# Altium footprint library FootPrintLib_11.PcbLib: 376 footprints (part 8 of 24)
Each footprint in its own frame and in the unit in brackets; x right, y up, seen from the top. Pads: shape width x height; smd on the part's side, far side on the other; paste and mask are expansions set on the pad; w line width, h text height; cw(c..) or ccw(c..) is an arc to the next point about the centre after c.
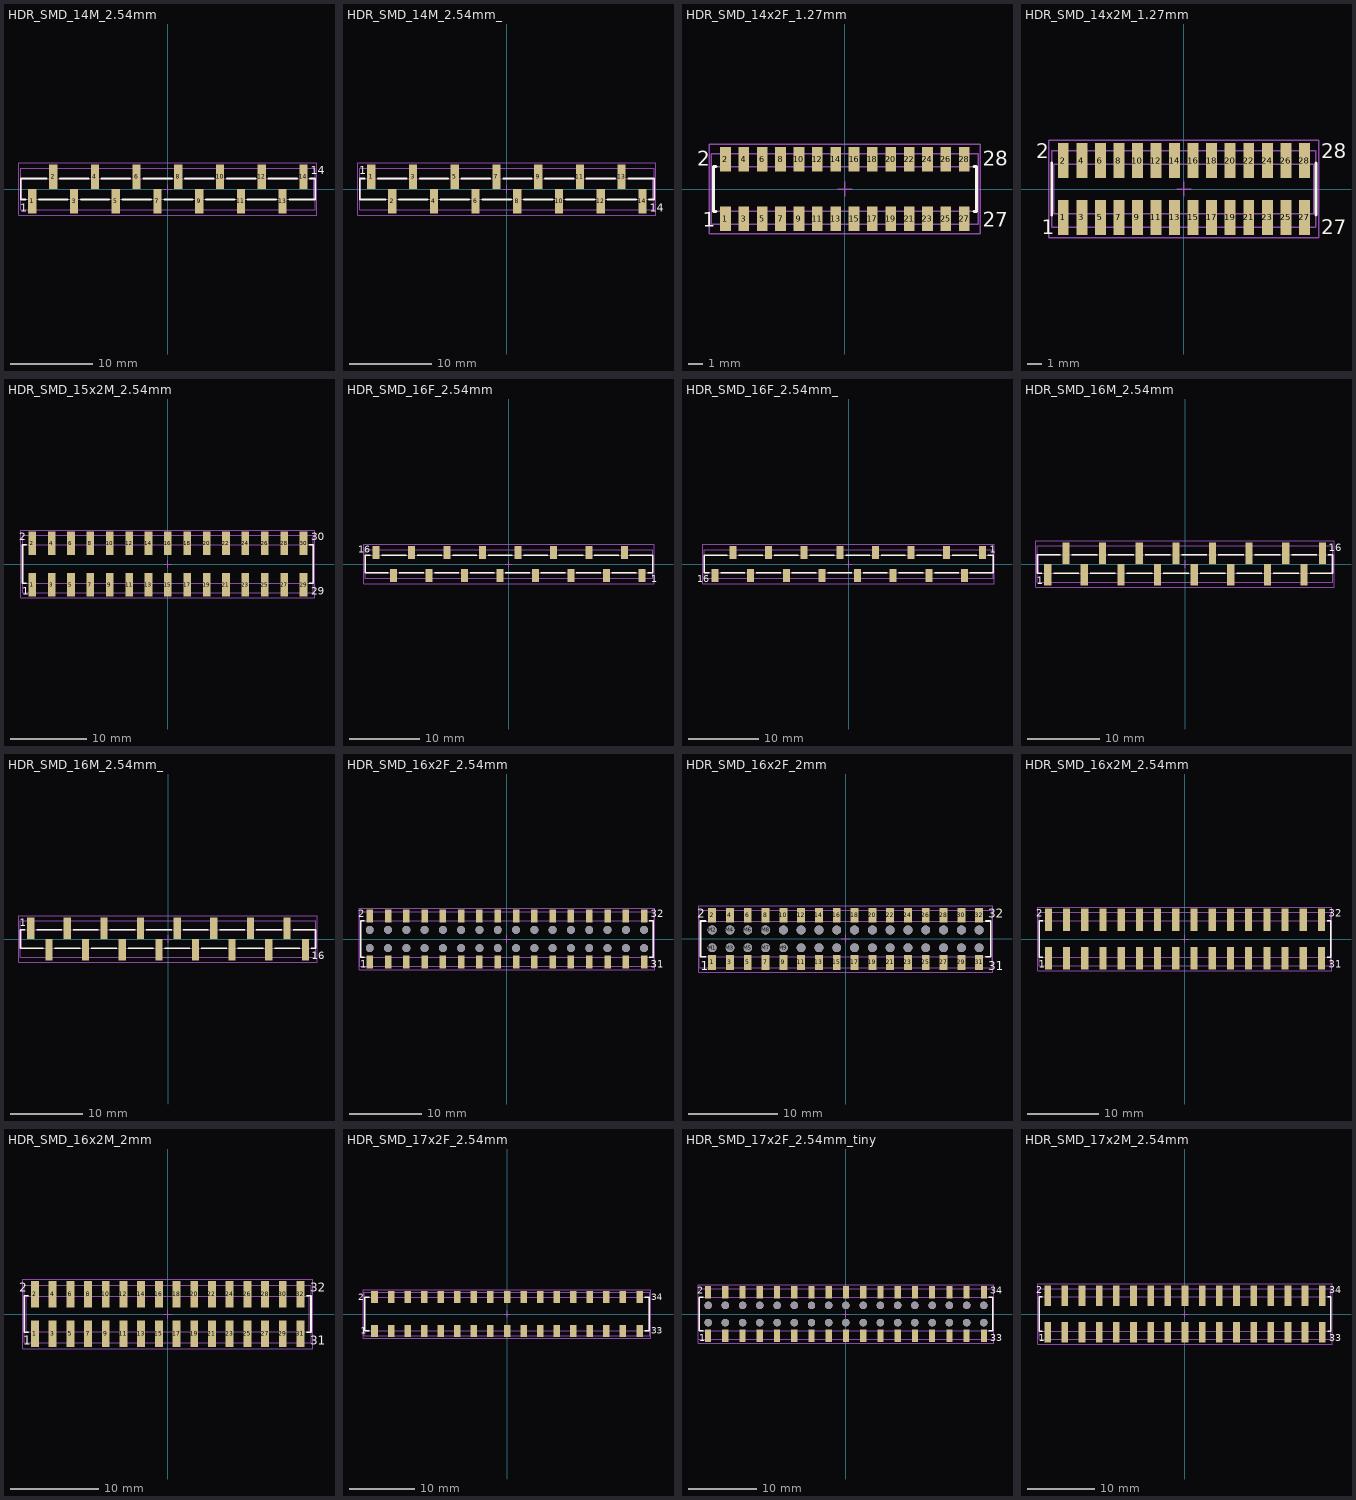
[diagram p7: the footprints below, top view; thin cyan lines are the x and y axes]

## HDR_SMD_14M_2.54mm [mm] "Pin Header, pitch 2.54 mm, SMD, Vertical, single row, 14p"
height 9.3
pads (14):
  rect 1x3 smd: 1(-16.51,-1.5) 2(-13.97,1.5) 3(-11.43,-1.5) 4(-8.89,1.5) 5(-6.35,-1.5) 6(-3.81,1.5) 7(-1.27,-1.5) 8(1.27,1.5) 9(3.81,-1.5) 10(6.35,1.5) 11(8.89,-1.5) 12(11.43,1.5) 13(13.97,-1.5) 14(16.51,1.5)
Top Overlay:
  lines w0.2: -17.3,-1.27 -17.93,-1.27 -17.93,1.27 -14.75,1.27 ; -15.7,-1.27 -12.2,-1.27 ; -13.16,1.27 -9.66,1.27 ; -10.62,-1.27 -7.12,-1.27 ; -8.08,1.27 -4.58,1.27 ; -5.54,-1.27 -2.04,-1.27 ; -3,1.27 0.5,1.27 ; -0.46,-1.27 3.04,-1.27 ; 2.08,1.27 5.58,1.27 ; 4.62,-1.27 8.12,-1.27 ; 7.16,1.27 10.66,1.27 ; 9.7,-1.27 13.2,-1.27 ; 12.24,1.27 15.74,1.27 ; 14.8,-1.27 17.93,-1.27 17.93,1.27 17.3,1.27
  text "14" at 17.4,1.8 h1
  text "1" at -18,-2.8 h1
Mechanical 11:
  lines w0.1: -17.78,-1.27 17.78,-1.27 17.78,1.27 -17.78,1.27 -17.78,-1.27
Mechanical 13:
  lines w0.1: -17.93,-2.5 -17.93,2.5 17.93,2.5 17.93,-2.5 -17.93,-2.5
Mechanical 15:
  lines w0.1: -0.5,0 0.5,0 ; 0,-0.5 0,0.5 ; -18.13,-3.2 -18.13,3.2 18.13,3.2 18.13,-3.2 -18.13,-3.2
3D body "61001418221.stp": height 9.33, standoff 0, extent -17.78,-2.5 17.78,2.5

## HDR_SMD_14M_2.54mm_ [mm] "Pin Header, pitch 2.54 mm, SMD, Vertical, single row, 14p"
height 9.3
pads (14):
  rect 1x3 smd: 1(-16.51,1.5) 2(-13.97,-1.5) 3(-11.43,1.5) 4(-8.89,-1.5) 5(-6.35,1.5) 6(-3.81,-1.5) 7(-1.27,1.5) 8(1.27,-1.5) 9(3.81,1.5) 10(6.35,-1.5) 11(8.89,1.5) 12(11.43,-1.5) 13(13.97,1.5) 14(16.51,-1.5)
Top Overlay:
  lines w0.2: -17.3,1.27 -17.93,1.27 -17.93,-1.27 -14.75,-1.27 ; -15.7,1.27 -12.2,1.27 ; -13.16,-1.27 -9.66,-1.27 ; -10.62,1.27 -7.12,1.27 ; -8.08,-1.27 -4.58,-1.27 ; -5.54,1.27 -2.04,1.27 ; -3,-1.27 0.5,-1.27 ; -0.46,1.27 3.04,1.27 ; 2.08,-1.27 5.58,-1.27 ; 4.62,1.27 8.12,1.27 ; 7.16,-1.27 10.66,-1.27 ; 9.7,1.27 13.2,1.27 ; 12.24,-1.27 15.74,-1.27 ; 14.8,1.27 17.93,1.27 17.93,-1.27 17.3,-1.27
  text "1" at -18,1.8 h1
  text "14" at 17.4,-2.8 h1
Mechanical 11:
  lines w0.1: -17.78,-1.27 17.78,-1.27 17.78,1.27 -17.78,1.27 -17.78,-1.27
Mechanical 13:
  lines w0.1: -17.93,-2.5 -17.93,2.5 17.93,2.5 17.93,-2.5 -17.93,-2.5
Mechanical 15:
  lines w0.1: -0.5,0 0.5,0 ; 0,-0.5 0,0.5 ; -18.13,-3.2 -18.13,3.2 18.13,3.2 18.13,-3.2 -18.13,-3.2
3D body "61001418321.stp": height 9.37, standoff 0.04, extent -17.78,-2.5 17.78,2.5

## HDR_SMD_14x2F_1.27mm [mm] "Socket Header, Pitch 1.27 mm, SMT, Vertical, dual row, 28p"
height 4.7
pads (28):
  rect 0.74x1.7 smd: 1(-8.255,-2.05) 2(-8.255,2.05) 3(-6.985,-2.05) 4(-6.985,2.05) 5(-5.715,-2.05) 6(-5.715,2.05) 7(-4.445,-2.05) 8(-4.445,2.05) 9(-3.175,-2.05) 10(-3.175,2.05) 11(-1.905,-2.05) 12(-1.905,2.05) 13(-0.635,-2.05) 14(-0.635,2.05) 15(0.635,-2.05) 16(0.635,2.05) 17(1.905,-2.05) 18(1.905,2.05) 19(3.175,-2.05) 20(3.175,2.05) 21(4.445,-2.05) 22(4.445,2.05) 23(5.715,-2.05) 24(5.715,2.05) 25(6.985,-2.05) 26(6.985,2.05) 27(8.255,-2.05) 28(8.255,2.05)
Top Overlay:
  lines w0.2: -8.92,-1.55 -9.09,-1.55 -9.09,1.55 -8.92,1.55 ; 8.92,-1.55 9.09,-1.55 9.09,1.55 8.92,1.55
  text "2" at -10.22,1.6 h1
  text "1" at -9.82,-2.6 h1
  text "27" at 9.52,-2.6 h1
  text "28" at 9.52,1.6 h1
Mechanical 11:
  lines w0.1: -9.09,-1.55 -9.09,1.55 9.09,1.55 9.09,-1.55 -9.09,-1.55
Mechanical 13:
  lines w0.1: -9.24,-2.425 9.24,-2.425 9.24,2.425 -9.24,2.425 -9.24,-2.425
Mechanical 15:
  lines w0.1: -0.5,0 0.5,0 ; 0,-0.5 0,0.5 ; -9.37,-3.1 9.37,-3.1 9.37,3.1 -9.37,3.1 -9.37,-3.1
3D body "62302821021.stp": height 4.6, standoff 0, extent -9.09,-2.299 9.09,2.299

## HDR_SMD_14x2M_1.27mm [mm] "Pin Header, pitch 1.27 mm, SMD, Vertical, dual row, 28p"
height 6.1
pads (28):
  rect 0.75x2.4 smd: 1(-8.255,-1.95) 2(-8.255,1.95) 3(-6.985,-1.95) 4(-6.985,1.95) 5(-5.715,-1.95) 6(-5.715,1.95) 7(-4.445,-1.95) 8(-4.445,1.95) 9(-3.175,-1.95) 10(-3.175,1.95) 11(-1.905,-1.95) 12(-1.905,1.95) 13(-0.635,-1.95) 14(-0.635,1.95) 15(0.635,-1.95) 16(0.635,1.95) 17(1.905,-1.95) 18(1.905,1.95) 19(3.175,-1.95) 20(3.175,1.95) 21(4.445,-1.95) 22(4.445,1.95) 23(5.715,-1.95) 24(5.715,1.95) 25(6.985,-1.95) 26(6.985,1.95) 27(8.255,-1.95) 28(8.255,1.95)
Top Overlay:
  lines w0.2: -9.04,-1.775 -9.04,1.775 ; 9.04,-1.775 9.04,1.775
  text "2" at -10.12,2.1 h1
  text "1" at -9.72,-3.1 h1
  text "27" at 9.42,-3.1 h1
  text "28" at 9.42,2.1 h1
Mechanical 11:
  lines w0.1: -8.89,-1.7 8.89,-1.7 8.89,1.7 -8.89,1.7 -8.89,-1.7
Mechanical 13:
  lines w0.1: -9.04,-2.625 -9.04,2.625 9.04,2.625 9.04,-2.625 -9.04,-2.625
Mechanical 15:
  lines w0.1: -0.5,0 0.5,0 ; 0,-0.5 0,0.5 ; -9.24,-3.35 -9.24,3.35 9.24,3.35 9.24,-3.35 -9.24,-3.35
3D body "62132821021.stp": height 5.9, standoff 0, extent -8.89,-2.55 8.89,2.55

## HDR_SMD_15x2M_2.54mm [mm] "Pin Header, pitch 2.54 mm, SMD, Vertical, dual row, 30p"
height 9.6
pads (30):
  rect 1x3.1 smd: 1(-17.78,-2.7) 2(-17.78,2.7) 3(-15.24,-2.7) 4(-15.24,2.7) 5(-12.7,-2.7) 6(-12.7,2.7) 7(-10.16,-2.7) 8(-10.16,2.7) 9(-7.62,-2.7) 10(-7.62,2.7) 11(-5.08,-2.7) 12(-5.08,2.7) 13(-2.54,-2.7) 14(-2.54,2.7) 15(0,-2.7) 16(0,2.7) 17(2.54,-2.7) 18(2.54,2.7) 19(5.08,-2.7) 20(5.08,2.7) 21(7.62,-2.7) 22(7.62,2.7) 23(10.16,-2.7) 24(10.16,2.7) 25(12.7,-2.7) 26(12.7,2.7) 27(15.24,-2.7) 28(15.24,2.7) 29(17.78,-2.7) 30(17.78,2.7)
Top Overlay:
  lines w0.2: -18.56,-2.54 -19.05,-2.54 -19.05,2.54 -18.56,2.54 ; 18.56,-2.54 19.05,-2.54 19.05,2.54 18.56,2.54
  text "1" at -19.11,-4 h1
  text "2" at -19.51,3.1 h1
  text "29" at 18.81,-4 h1
  text "30" at 18.81,3.1 h1
Mechanical 11:
  lines w0.1: -19.05,-2.54 19.05,-2.54 19.05,2.54 -19.05,2.54 -19.05,-2.54
Mechanical 13:
  lines w0.1: -19.05,-3.75 -19.05,3.75 19.05,3.75 19.05,-3.75 -19.05,-3.75
Mechanical 15:
  lines w0.1: -0.5,0 0.5,0 ; 0,-0.5 0,0.5 ; -19.25,-4.45 -19.25,4.45 19.25,4.45 19.25,-4.45 -19.25,-4.45
3D body "61003021121.stp": height 9.62, standoff 0.02, extent -19.05,-3.75 19.05,3.75

## HDR_SMD_16F_2.54mm [mm] "Socket Header, Pitch 2.54 mm, SMT, Vertical, single row, 16p"
height 7.5
pads (16):
  rect 1x1.91 smd: 1(19.05,-1.645) 2(16.51,1.645) 3(13.97,-1.645) 4(11.43,1.645) 5(8.89,-1.645) 6(6.35,1.645) 7(3.81,-1.645) 8(1.27,1.645) 9(-1.27,-1.645) 10(-3.81,1.645) 11(-6.35,-1.645) 12(-8.89,1.645) 13(-11.43,-1.645) 14(-13.97,1.645) 15(-16.51,-1.645) 16(-19.05,1.645)
Top Overlay:
  lines w0.2: -19.84,1.25 -20.57,1.25 -20.57,-1.25 -17.29,-1.25 ; -18.24,1.25 -14.74,1.25 ; -15.74,-1.25 -12.24,-1.25 ; -13.16,1.25 -9.66,1.25 ; -10.66,-1.25 -7.16,-1.25 ; -8.08,1.25 -4.58,1.25 ; -5.58,-1.25 -2.08,-1.25 ; -3,1.25 0.5,1.25 ; -0.5,-1.25 3,-1.25 ; 2.08,1.25 5.58,1.25 ; 4.58,-1.25 8.08,-1.25 ; 7.16,1.25 10.66,1.25 ; 9.66,-1.25 13.16,-1.25 ; 12.24,1.25 15.74,1.25 ; 14.74,-1.25 18.24,-1.25 ; 17.29,1.25 20.57,1.25 20.57,-1.25 19.84,-1.25
  text "1" at 20.34,-2.6 h1
  text "16" at -21.62,1.6 h1
Mechanical 11:
  lines w0.1: -20.57,-1.25 20.57,-1.25 20.57,1.25 -20.57,1.25 -20.57,-1.25
Mechanical 13:
  lines w0.1: -20.57,-2.025 20.57,-2.025 20.57,2.025 -20.57,2.025 -20.57,-2.025
Mechanical 15:
  lines w0.1: -0.5,0 0.5,0 ; 0,-0.5 0,0.5 ; -20.77,-2.8 20.77,-2.8 20.77,2.8 -20.77,2.8 -20.77,-2.8
3D body "61001611921.stp": height 7.5, standoff 0, extent -20.57,-2.025 20.57,2.025

## HDR_SMD_16F_2.54mm_ [mm] "Socket Header, Pitch 2.54 mm, SMT, Vertical, single row, 16p"
height 7.5
pads (16):
  rect 1x1.91 smd: 1(19.05,1.645) 2(16.51,-1.645) 3(13.97,1.645) 4(11.43,-1.645) 5(8.89,1.645) 6(6.35,-1.645) 7(3.81,1.645) 8(1.27,-1.645) 9(-1.27,1.645) 10(-3.81,-1.645) 11(-6.35,1.645) 12(-8.89,-1.645) 13(-11.43,1.645) 14(-13.97,-1.645) 15(-16.51,1.645) 16(-19.05,-1.645)
Top Overlay:
  lines w0.2: -19.84,-1.25 -20.57,-1.25 -20.57,1.25 -17.29,1.25 ; -18.24,-1.25 -14.79,-1.25 ; -15.69,1.25 -12.24,1.25 ; -13.16,-1.25 -9.71,-1.25 ; -10.61,1.25 -7.16,1.25 ; -8.08,-1.25 -4.63,-1.25 ; -5.53,1.25 -2.08,1.25 ; -3,-1.25 0.45,-1.25 ; -0.45,1.25 3,1.25 ; 2.08,-1.25 5.53,-1.25 ; 4.63,1.25 8.08,1.25 ; 7.16,-1.25 10.61,-1.25 ; 9.71,1.25 13.16,1.25 ; 12.24,-1.25 15.69,-1.25 ; 14.79,1.25 18.24,1.25 ; 17.29,-1.25 20.57,-1.25 20.57,1.25 19.84,1.25
  text "1" at 20.14,1.6 h1
  text "16" at -21.62,-2.6 h1
Mechanical 11:
  lines w0.1: -20.57,-1.25 20.57,-1.25 20.57,1.25 -20.57,1.25 -20.57,-1.25
Mechanical 13:
  lines w0.1: -20.57,-2.025 -20.57,2.025 20.57,2.025 20.57,-2.025 -20.57,-2.025
Mechanical 15:
  lines w0.1: -0.5,0 0.5,0 ; 0,-0.5 0,0.5 ; -20.77,-2.8 -20.77,2.8 20.77,2.8 20.77,-2.8 -20.77,-2.8
3D body "61001613321.stp": height 7.5, standoff 0, extent -20.57,-2.025 20.57,2.025

## HDR_SMD_16M_2.54mm [mm] "Pin Header, pitch 2.54 mm, SMD, Vertical, single row, 16p"
height 9.3
pads (16):
  rect 1x3 smd: 1(-19.05,-1.5) 2(-16.51,1.5) 3(-13.97,-1.5) 4(-11.43,1.5) 5(-8.89,-1.5) 6(-6.35,1.5) 7(-3.81,-1.5) 8(-1.27,1.5) 9(1.27,-1.5) 10(3.81,1.5) 11(6.35,-1.5) 12(8.89,1.5) 13(11.43,-1.5) 14(13.97,1.5) 15(16.51,-1.5) 16(19.05,1.5)
Top Overlay:
  lines w0.2: -19.84,-1.27 -20.47,-1.27 -20.47,1.27 -17.29,1.27 ; -18.24,-1.27 -14.74,-1.27 ; -15.7,1.27 -12.2,1.27 ; -13.16,-1.27 -9.66,-1.27 ; -10.62,1.27 -7.12,1.27 ; -8.08,-1.27 -4.58,-1.27 ; -5.54,1.27 -2.04,1.27 ; -3,-1.27 0.5,-1.27 ; -0.46,1.27 3.04,1.27 ; 2.08,-1.27 5.58,-1.27 ; 4.62,1.27 8.12,1.27 ; 7.16,-1.27 10.66,-1.27 ; 9.7,1.27 13.2,1.27 ; 12.24,-1.27 15.74,-1.27 ; 14.78,1.27 18.28,1.27 ; 17.34,-1.27 20.47,-1.27 20.47,1.27 19.84,1.27
  text "1" at -20.54,-2.8 h1
  text "16" at 19.94,1.8 h1
Mechanical 11:
  lines w0.1: -20.32,-1.27 -20.32,1.27 20.32,1.27 20.32,-1.27 -20.32,-1.27
Mechanical 13:
  lines w0.1: -20.47,-2.5 20.47,-2.5 20.47,2.5 -20.47,2.5 -20.47,-2.5
Mechanical 15:
  lines w0.1: -0.5,0 0.5,0 ; 0,-0.5 0,0.5 ; -20.67,-3.2 20.67,-3.2 20.67,3.2 -20.67,3.2 -20.67,-3.2
3D body "61001618221.stp": height 9.33, standoff 0, extent -20.32,-2.5 20.32,2.5

## HDR_SMD_16M_2.54mm_ [mm] "Pin Header, pitch 2.54 mm, SMD, Vertical, single row, 16p"
height 9.3
pads (16):
  rect 1x3 smd: 1(-19.05,1.5) 2(-16.51,-1.5) 3(-13.97,1.5) 4(-11.43,-1.5) 5(-8.89,1.5) 6(-6.35,-1.5) 7(-3.81,1.5) 8(-1.27,-1.5) 9(1.27,1.5) 10(3.81,-1.5) 11(6.35,1.5) 12(8.89,-1.5) 13(11.43,1.5) 14(13.97,-1.5) 15(16.51,1.5) 16(19.05,-1.5)
Top Overlay:
  lines w0.2: -19.84,1.27 -20.47,1.27 -20.47,-1.27 -17.29,-1.27 ; -18.24,1.27 -14.74,1.27 ; -15.7,-1.27 -12.2,-1.27 ; -13.16,1.27 -9.66,1.27 ; -10.62,-1.27 -7.12,-1.27 ; -8.08,1.27 -4.58,1.27 ; -5.54,-1.27 -2.04,-1.27 ; -3,1.27 0.5,1.27 ; -0.46,-1.27 3.04,-1.27 ; 2.08,1.27 5.58,1.27 ; 4.62,-1.27 8.12,-1.27 ; 7.16,1.27 10.66,1.27 ; 9.7,-1.27 13.2,-1.27 ; 12.24,1.27 15.74,1.27 ; 14.78,-1.27 18.28,-1.27 ; 17.34,1.27 20.47,1.27 20.47,-1.27 19.84,-1.27
  text "1" at -20.54,1.8 h1
  text "16" at 19.94,-2.8 h1
Mechanical 11:
  lines w0.1: -20.32,-1.27 20.32,-1.27 20.32,1.27 -20.32,1.27 -20.32,-1.27
Mechanical 13:
  lines w0.1: -20.47,-2.5 -20.47,2.5 20.47,2.5 20.47,-2.5 -20.47,-2.5
Mechanical 15:
  lines w0.1: -0.5,0 0.5,0 ; 0,-0.5 0,0.5 ; -20.67,-3.2 -20.67,3.2 20.67,3.2 20.67,-3.2 -20.67,-3.2
3D body "61001618321.stp": height 9.37, standoff 0.04, extent -20.32,-2.5 20.32,2.5

## HDR_SMD_16x2F_2.54mm [mm] "Socket Header, Pitch 2.54 mm, SMT, Vertical, dual row, 32p"
height 3.7
pads (64):
  rect 0.9x1.8 smd: 1(-19.05,-3.2) 2(-19.05,3.2) 3(-16.51,-3.2) 4(-16.51,3.2) 5(-13.97,-3.2) 6(-13.97,3.2) 7(-11.43,-3.2) 8(-11.43,3.2) 9(-8.89,-3.2) 10(-8.89,3.2) 11(-6.35,-3.2) 12(-6.35,3.2) 13(-3.81,-3.2) 14(-3.81,3.2) 15(-1.27,-3.2) 16(-1.27,3.2) 17(1.27,-3.2) 18(1.27,3.2) 19(3.81,-3.2) 20(3.81,3.2) 21(6.35,-3.2) 22(6.35,3.2) 23(8.89,-3.2) 24(8.89,3.2) 25(11.43,-3.2) 26(11.43,3.2) 27(13.97,-3.2) 28(13.97,3.2) 29(16.51,-3.2) 30(16.51,3.2) 31(19.05,-3.2) 32(19.05,3.2)
  round 1.1 hole 1.1 unplated: MH1(-19.05,-1.27) MH2(-19.05,1.27) MH3(-16.51,-1.27) MH4(-16.51,1.27) MH5(-13.97,-1.27) MH6(-13.97,1.27) MH7(-11.43,-1.27) MH8(-11.43,1.27) MH9(-8.89,-1.27) MH10(-8.89,1.27) MH11(-6.35,-1.27) MH12(-6.35,1.27) MH13(-3.81,-1.27) MH14(-3.81,1.27) MH15(-1.27,-1.27) MH16(-1.27,1.27) MH17(1.27,-1.27) MH18(1.27,1.27) MH19(3.81,-1.27) MH20(3.81,1.27) MH21(6.35,-1.27) MH22(6.35,1.27) MH23(8.89,-1.27) MH24(8.89,1.27) MH25(11.43,-1.27) MH26(11.43,1.27) MH27(13.97,-1.27) MH28(13.97,1.27) MH29(16.51,-1.27) MH30(16.51,1.27) MH31(19.05,-1.27) MH32(19.05,1.27)
Top Overlay:
  lines w0.2: -19.78,-2.5 -20.32,-2.5 -20.32,2.5 -19.78,2.5 ; 19.78,-2.5 20.32,-2.5 20.32,2.5 19.78,2.5
  text "2" at -20.68,3 h1
  text "1" at -20.38,-4 h1
  text "32" at 19.98,3 h1
  text "31" at 19.98,-4 h1
Mechanical 11:
  lines w0.1: -20.32,-2.5 20.32,-2.5 20.32,2.5 -20.32,2.5 -20.32,-2.5
Mechanical 13:
  lines w0.1: -20.47,-3.75 20.47,-3.75 20.47,3.75 -20.47,3.75 -20.47,-3.75
Mechanical 15:
  lines w0.1: -0.5,0 0.5,0 ; 0,-0.5 0,0.5 ; -20.52,-4.3 20.52,-4.3 20.52,4.3 -20.52,4.3 -20.52,-4.3
3D body "610032243021.stp": height 3.7, standoff 0, extent -20.32,-3.603 20.32,3.603

## HDR_SMD_16x2F_2mm [mm] "Socket Header, Pitch 2.00 mm, SMT, Vertical, dual row, 32p"
height 4.85
pads (64):
  rect 0.89x1.65 smd: 1(-15,-2.65) 2(-15,2.65) 3(-13,-2.65) 4(-13,2.65) 5(-11,-2.65) 6(-11,2.65) 7(-9,-2.65) 8(-9,2.65) 9(-7,-2.65) 10(-7,2.65) 11(-5,-2.65) 12(-5,2.65) 13(-3,-2.65) 14(-3,2.65) 15(-1,-2.65) 16(-1,2.65) 17(1,-2.65) 18(1,2.65) 19(3,-2.65) 20(3,2.65) 21(5,-2.65) 22(5,2.65) 23(7,-2.65) 24(7,2.65) 25(9,-2.65) 26(9,2.65) 27(11,-2.65) 28(11,2.65) 29(13,-2.65) 30(13,2.65) 31(15,-2.65) 32(15,2.65)
  round 1 hole 1 unplated: M1(-15,-1) M2(-15,1) M3(-13,-1) M4(-13,1) M5(-11,-1) M6(-11,1) M7(-9,-1) M8(-9,1) M9(-7,-1) M10(-7,1) M11(-5,-1) M12(-5,1) M13(-3,-1) M14(-3,1) M15(-1,-1) M16(-1,1) M17(1,-1) M18(1,1) M19(3,-1) M20(3,1) M21(5,-1) M22(5,1) M23(7,-1) M24(7,1) M25(9,-1) M26(9,1) M27(11,-1) M28(11,1) M29(13,-1) M30(13,1) M31(15,-1) M32(15,1)
Top Overlay:
  lines w0.2: -15.75,-2 -16.3,-2 -16.3,2 -15.75,2 ; 15.75,-2 16.3,-2 16.3,2 15.75,2
  text "1" at -16.3,-3.5 h1
  text "2" at -16.7,2.4 h1
  text "31" at 16,-3.5 h1
  text "32" at 16,2.4 h1
Mechanical 11:
  lines w0.1: -16.3,-2 -16.3,2 16.3,2 16.3,-2 -16.3,-2
Mechanical 13:
  lines w0.1: -16.45,-3.225 -16.45,3.225 16.45,3.225 16.45,-3.225 -16.45,-3.225
Mechanical 15:
  lines w0.1: -0.5,0 0.5,0 ; 0,-0.5 0,0.5 ; -16.5,-3.734 -16.5,3.708 16.5,3.708 16.5,-3.734 -16.5,-3.734
3D body "621332242921.stp": height 4.5, standoff 0, extent -16.25,-2.897 16.25,2.898

## HDR_SMD_16x2M_2.54mm [mm] "Pin Header, pitch 2.54 mm, SMD, Vertical, dual row, 32p"
height 9.6
pads (32):
  rect 1x3.1 smd: 1(-19.05,-2.7) 2(-19.05,2.7) 3(-16.51,-2.7) 4(-16.51,2.7) 5(-13.97,-2.7) 6(-13.97,2.7) 7(-11.43,-2.7) 8(-11.43,2.7) 9(-8.89,-2.7) 10(-8.89,2.7) 11(-6.35,-2.7) 12(-6.35,2.7) 13(-3.81,-2.7) 14(-3.81,2.7) 15(-1.27,-2.7) 16(-1.27,2.7) 17(1.27,-2.7) 18(1.27,2.7) 19(3.81,-2.7) 20(3.81,2.7) 21(6.35,-2.7) 22(6.35,2.7) 23(8.89,-2.7) 24(8.89,2.7) 25(11.43,-2.7) 26(11.43,2.7) 27(13.97,-2.7) 28(13.97,2.7) 29(16.51,-2.7) 30(16.51,2.7) 31(19.05,-2.7) 32(19.05,2.7)
Top Overlay:
  lines w0.2: -19.83,-2.54 -20.32,-2.54 -20.32,2.54 -19.83,2.54 ; 19.83,-2.54 20.32,-2.54 20.32,2.54 19.83,2.54
  text "1" at -20.38,-4 h1
  text "2" at -20.78,3.1 h1
  text "31" at 20.08,-4 h1
  text "32" at 20.08,3.1 h1
Mechanical 11:
  lines w0.1: -20.32,-2.54 20.32,-2.54 20.32,2.54 -20.32,2.54 -20.32,-2.54
Mechanical 13:
  lines w0.1: -20.32,-3.75 -20.32,3.75 20.32,3.75 20.32,-3.75 -20.32,-3.75
Mechanical 15:
  lines w0.1: -0.5,0 0.5,0 ; 0,-0.5 0,0.5 ; -20.52,-4.45 -20.52,4.45 20.52,4.45 20.52,-4.45 -20.52,-4.45
3D body "61003221121.stp": height 9.62, standoff 0.02, extent -20.32,-3.75 20.32,3.75

## HDR_SMD_16x2M_2mm [mm] "Pin Header, pitch 2.00 mm, SMD, Vertical, dual row, 32p"
height 6.8
pads (32):
  rect 0.89x3 smd: 1(-15,-2.25) 2(-15,2.25) 3(-13,-2.25) 4(-13,2.25) 5(-11,-2.25) 6(-11,2.25) 7(-9,-2.25) 8(-9,2.25) 9(-7,-2.25) 10(-7,2.25) 11(-5,-2.25) 12(-5,2.25) 13(-3,-2.25) 14(-3,2.25) 15(-1,-2.25) 16(-1,2.25) 17(1,-2.25) 18(1,2.25) 19(3,-2.25) 20(3,2.25) 21(5,-2.25) 22(5,2.25) 23(7,-2.25) 24(7,2.25) 25(9,-2.25) 26(9,2.25) 27(11,-2.25) 28(11,2.25) 29(13,-2.25) 30(13,2.25) 31(15,-2.25) 32(15,2.25)
Top Overlay:
  lines w0.2: -15.75,-2.075 -16.2,-2.075 -16.2,2.075 -15.75,2.075 ; 15.75,-2.075 16.2,-2.075 16.2,2.075 15.75,2.075
  text "2" at -16.8,2.5 h1
  text "1" at -16.3,-3.5 h1
  text "31" at 16.1,-3.5 h1
  text "32" at 16.1,2.5 h1
Mechanical 11:
  lines w0.1: -16,-2 -16,2 16,2 16,-2 -16,-2
Mechanical 13:
  lines w0.1: -16.2,-3.225 16.2,-3.225 16.2,3.225 -16.2,3.225 -16.2,-3.225
Mechanical 15:
  lines w0.1: -0.5,0 0.5,0 ; 0,-0.5 0,0.5 ; -16.4,-3.95 16.4,-3.95 16.4,3.95 -16.4,3.95 -16.4,-3.95
3D body "62133221921.stp": height 6.7, standoff 0, extent -16,-3.1 16,3.1

## HDR_SMD_17x2F_2.54mm [mm] "Socket Header, Pitch 2.54 mm, SMT, Vertical, dual row, 34p"
height 7.45
pads (34):
  rect 1x1.8 smd: 1(-20.32,-2.6) 2(-20.32,2.6) 3(-17.78,-2.6) 4(-17.78,2.6) 5(-15.24,-2.6) 6(-15.24,2.6) 7(-12.7,-2.6) 8(-12.7,2.6) 9(-10.16,-2.6) 10(-10.16,2.6) 11(-7.62,-2.6) 12(-7.62,2.6) 13(-5.08,-2.6) 14(-5.08,2.6) 15(-2.54,-2.6) 16(-2.54,2.6) 17(0,-2.6) 18(0,2.6) 19(2.54,-2.6) 20(2.54,2.6) 21(5.08,-2.6) 22(5.08,2.6) 23(7.62,-2.6) 24(7.62,2.6) 25(10.16,-2.6) 26(10.16,2.6) 27(12.7,-2.6) 28(12.7,2.6) 29(15.24,-2.6) 30(15.24,2.6) 31(17.78,-2.6) 32(17.78,2.6) 33(20.32,-2.6) 34(20.32,2.6)
Top Overlay:
  lines w0.2: -21.1,-2.54 -21.84,-2.54 -21.84,2.54 -21.1,2.54 ; 21.1,-2.54 21.84,-2.54 21.84,2.54 21.1,2.54
  text "2" at -22.85,2.1 h1
  text "1" at -22.45,-3 h1
  text "33" at 22.15,-3 h1
  text "34" at 22.15,2.1 h1
Mechanical 11:
  lines w0.1: -21.84,-2.54 21.84,-2.54 21.84,2.54 -21.84,2.54 -21.84,-2.54
Mechanical 13:
  lines w0.1: -21.915,-3.35 21.915,-3.35 21.915,3.35 -21.915,3.35 -21.915,-3.35
Mechanical 15:
  lines w0.1: -0.5,0 0.5,0 ; 0,-0.5 0,0.5 ; -22.04,-3.7 22.04,-3.7 22.04,3.7 -22.04,3.7 -22.04,-3.7
3D body "61003421821.stp": height 7.5, standoff 0, extent -21.59,-3.35 21.59,3.35

## HDR_SMD_17x2F_2.54mm_tiny [mm] "Socket Header, Pitch 2.54 mm, SMT, Vertical, dual row, 34p"
height 3.7
pads (68):
  rect 0.9x1.8 smd: 1(-20.32,-3.2) 2(-20.32,3.2) 3(-17.78,-3.2) 4(-17.78,3.2) 5(-15.24,-3.2) 6(-15.24,3.2) 7(-12.7,-3.2) 8(-12.7,3.2) 9(-10.16,-3.2) 10(-10.16,3.2) 11(-7.62,-3.2) 12(-7.62,3.2) 13(-5.08,-3.2) 14(-5.08,3.2) 15(-2.54,-3.2) 16(-2.54,3.2) 17(0,-3.2) 18(0,3.2) 19(2.54,-3.2) 20(2.54,3.2) 21(5.08,-3.2) 22(5.08,3.2) 23(7.62,-3.2) 24(7.62,3.2) 25(10.16,-3.2) 26(10.16,3.2) 27(12.7,-3.2) 28(12.7,3.2) 29(15.24,-3.2) 30(15.24,3.2) 31(17.78,-3.2) 32(17.78,3.2) 33(20.32,-3.2) 34(20.32,3.2)
  round 1.1 hole 1.1 unplated: MH1(-20.32,-1.27) MH2(-20.32,1.27) MH3(-17.78,-1.27) MH4(-17.78,1.27) MH5(-15.24,-1.27) MH6(-15.24,1.27) MH7(-12.7,-1.27) MH8(-12.7,1.27) MH9(-10.16,-1.27) MH10(-10.16,1.27) MH11(-7.62,-1.27) MH12(-7.62,1.27) MH13(-5.08,-1.27) MH14(-5.08,1.27) MH15(-2.54,-1.27) MH16(-2.54,1.27) MH17(0,-1.27) MH18(0,1.27) MH19(2.54,-1.27) MH20(2.54,1.27) MH21(5.08,-1.27) MH22(5.08,1.27) MH23(7.62,-1.27) MH24(7.62,1.27) MH25(10.16,-1.27) MH26(10.16,1.27) MH27(12.7,-1.27) MH28(12.7,1.27) MH29(15.24,-1.27) MH30(15.24,1.27) MH31(17.78,-1.27) MH32(17.78,1.27) MH33(20.32,-1.27) MH34(20.32,1.27)
Top Overlay:
  lines w0.2: -21.05,-2.5 -21.59,-2.5 -21.59,2.5 -21.05,2.5 ; 21.05,-2.5 21.59,-2.5 21.59,2.5 21.05,2.5
  text "1" at -21.65,-4 h1
  text "2" at -21.95,3 h1
  text "34" at 21.25,3 h1
  text "33" at 21.25,-4 h1
Mechanical 11:
  lines w0.1: -21.59,-2.5 -21.59,2.5 21.59,2.5 21.59,-2.5 -21.59,-2.5
Mechanical 13:
  lines w0.1: -21.74,-3.75 -21.74,3.75 21.74,3.75 21.74,-3.75 -21.74,-3.75
Mechanical 15:
  lines w0.1: -0.5,0 0.5,0 ; 0,-0.5 0,0.5 ; -21.79,-4.3 -21.79,4.3 21.79,4.3 21.79,-4.3 -21.79,-4.3
3D body "610034243021.stp": height 3.7, standoff 0, extent -21.59,-3.603 21.59,3.603

## HDR_SMD_17x2M_2.54mm [mm] "Pin Header, pitch 2.54 mm, SMD, Vertical, dual row, 34p"
height 9.6
pads (34):
  rect 1x3.1 smd: 1(-20.32,-2.7) 2(-20.32,2.7) 3(-17.78,-2.7) 4(-17.78,2.7) 5(-15.24,-2.7) 6(-15.24,2.7) 7(-12.7,-2.7) 8(-12.7,2.7) 9(-10.16,-2.7) 10(-10.16,2.7) 11(-7.62,-2.7) 12(-7.62,2.7) 13(-5.08,-2.7) 14(-5.08,2.7) 15(-2.54,-2.7) 16(-2.54,2.7) 17(0,-2.7) 18(0,2.7) 19(2.54,-2.7) 20(2.54,2.7) 21(5.08,-2.7) 22(5.08,2.7) 23(7.62,-2.7) 24(7.62,2.7) 25(10.16,-2.7) 26(10.16,2.7) 27(12.7,-2.7) 28(12.7,2.7) 29(15.24,-2.7) 30(15.24,2.7) 31(17.78,-2.7) 32(17.78,2.7) 33(20.32,-2.7) 34(20.32,2.7)
Top Overlay:
  lines w0.2: -21.1,-2.54 -21.59,-2.54 -21.59,2.54 -21.1,2.54 ; 21.1,-2.54 21.59,-2.54 21.59,2.54 21.1,2.54
  text "2" at -22.05,3.1 h1
  text "1" at -21.65,-4 h1
  text "33" at 21.35,-4 h1
  text "34" at 21.35,3.1 h1
Mechanical 11:
  lines w0.1: -21.59,-2.54 -21.59,2.54 21.59,2.54 21.59,-2.54 -21.59,-2.54
Mechanical 13:
  lines w0.1: -21.59,-3.75 21.59,-3.75 21.59,3.75 -21.59,3.75 -21.59,-3.75
Mechanical 15:
  lines w0.1: -0.5,0 0.5,0 ; 0,-0.5 0,0.5 ; -21.79,-4.45 21.79,-4.45 21.79,4.45 -21.79,4.45 -21.79,-4.45
3D body "61003421121.stp": height 9.62, standoff 0.02, extent -21.59,-3.75 21.59,3.75